# Altium PCB USB_C_MECH.PcbLib
Units mm, origin at the board's own origin, x right, y up, seen from the top; angles counter-clockwise.
Board outline not stored, 2 copper layers (Top, Bottom), stack 0 mm thick; 1 components, 0 nets, 14 pads, 0 vias.
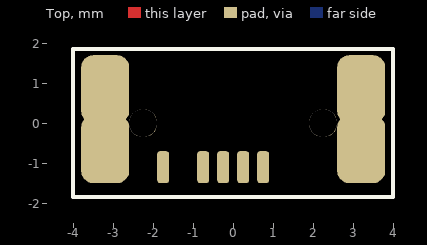
[diagram p0: Top view]
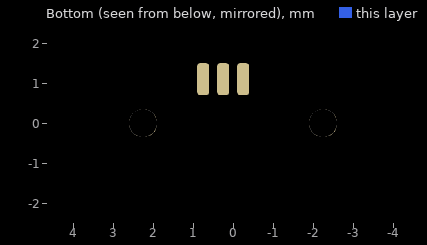
[diagram p1: Bottom view, seen from below]

## Layer stack, top to bottom

## Components (designator, comment, footprint, x,y, rotation, side; value= is the part's Value field where it differs from the comment)
? "" ? 0,0 r0 top

## Footprints (in the part's own frame and the unit in brackets; to place one, negate y for a bottom-side part, rotate by r counter-clockwise, add the part's x,y. Pads: shape width x height; smd on the part's side, far side on the other; paste and mask are expansions set on the pad)
? [mm]

## Free pads (board coordinates)
  rrect50% 1.2x1.7 smd: ""(-3.2,-0.65) ""(-3.2,0.85) ""(3.2,-0.65) ""(3.2,0.85)
  round 0.7 hole 0.7 unplated: ""(-2.25,0) ""(2.25,0)
  rrect50% 0.3x0.8 smd: ""(-1.75,-1.1) ""(-0.75,-1.1) ""(-0.25,-1.1) ""(0.25,-1.1) ""(0.75,-1.1)
  rrect50% 0.3x0.8 smd far side: ""(-0.25,1.1) ""(0.25,1.1) ""(0.75,1.1)

## Nets (pads, with @x,y where several pads share a name; then routed paths per layer and width w, separated by ;. In a path a pad name is that pad's centre, name@x,y a point inside that pad or via, vN(x,y) a via of type N, cw(c..) or ccw(c..) an arc to the next point about the centre after c; other vN are vias at no path point)

## Silkscreen, mask and mechanical layers (free items; w line width, h text height)
Top Overlay:
  lines w0.1: -4,-1.85 4,-1.85 4,1.85 -4,1.85 -4,-1.85
  text "A1" at -2.2,-2.05 h0